# Altium schematic symbol library Temperature_Sensor.SchLib: 1 symbol
Pins are listed as number, name and electrical type; pins without a type are passive.

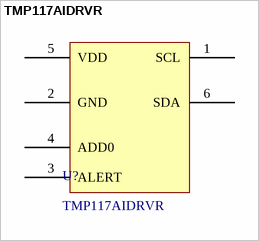
[diagram p0: symbol TMP117AIDRVR]

## TMP117AIDRVR
designator U?
High-Accuracy, Low-Power, Digital Temperature Sensor With SMBus- and I2C-Compatible Interface; Manufacturer: Texas Instruments; Current Rating: 220 uA; Supply Voltage - Max: 5.5 V; Supply Voltage - Min: 1.8 V; Accuracy: +/- 0.1 C; Interface Type: 2-Wire, I2C, SMBus; Resolution: 16 bit; ComponentLink1Description: Datasheet; ComponentLink1URL: https://www.lcsc.com/datasheet/C699536.pdf?spm=wm.sxq.inf.ggs___wm.fly.bg.0.xh&lcsc_vid=EgBcAV1UFlAKBQdXRlNcUAEEFFIIXl0ARllXUAFfEQQxVlNfQ1hZVlRWQFVXUTsOAxUeFF5JWBYZEEoKFBINSQcJGk4NBhADEA4cHktRQlRADxALGw%3D%3D; LCSC Part #: C699536; Manufacturer Part Number: TMP117AIDRVR; Mount: SMD/SMT; Operating Temperature Max: + 150 C; Operating Temperature Min: - 55 C; Package / Case: WSON-6; Packaging: Tape and Reel; Supplier 1 Part Number: 595-TMP117AIDRVR; Supplier 1 URL: https://www.mouser.vn/en/ProductDetail/Texas-Instruments/TMP117AIDRVR?qs=qSfuJ%252Bfl%2Fd6nh9h5HydMXQ%3D%3D; Supplier 1: Mouser; Supplier 2 Part Number: 296-51834-2-ND; Supplier 2 URL: https://www.digikey.com/en/products/detail/texas-instruments/tmp117aidrvr/9685284; Supplier 2: Digi-Key; Supplier 3 Part Number: N/A; Supplier 3 URL: N/A; Supplier 3: thegioiic; Value: TMP117AIDRVR
footprint TMP117AIDRVR_WSON-6 (SON, 6-Leads, Body 2.00x2.00mm, Pitch 0.65mm, Thermal Pad 1.60x0.89mm, IPC Medium Density)
pins: 1 SCL, 2 GND, 3 ALERT, 4 ADD0, 5 VDD, 6 SDA